# Altium schematic symbol library R_39K7.SchLib: 1 symbol
Pins are listed as number, name and electrical type; pins without a type are passive.

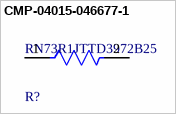
[diagram p0: symbol CMP-04015-046677-1]

## CMP-04015-046677-1
designator R?, comment RN73R1JTTD3972B25
39.7kΩ ±0.1% 0.1W, 1/10W Chip Resistor 0603 (1608 Metric) Moisture Resistant Thin Film
footprint FP-RN73R1J-IPC_B
footprint FP-RN73R1J-MFG
footprint FP-RN73R1J-IPC_A
footprint FP-RN73R1J-IPC_C
pins: 1, 2